# Altium schematic symbol library DIM.SCHLIB: 488 symbols (part 1 of 5)
Pins are listed as number, name and electrical type; pins without a type are passive.

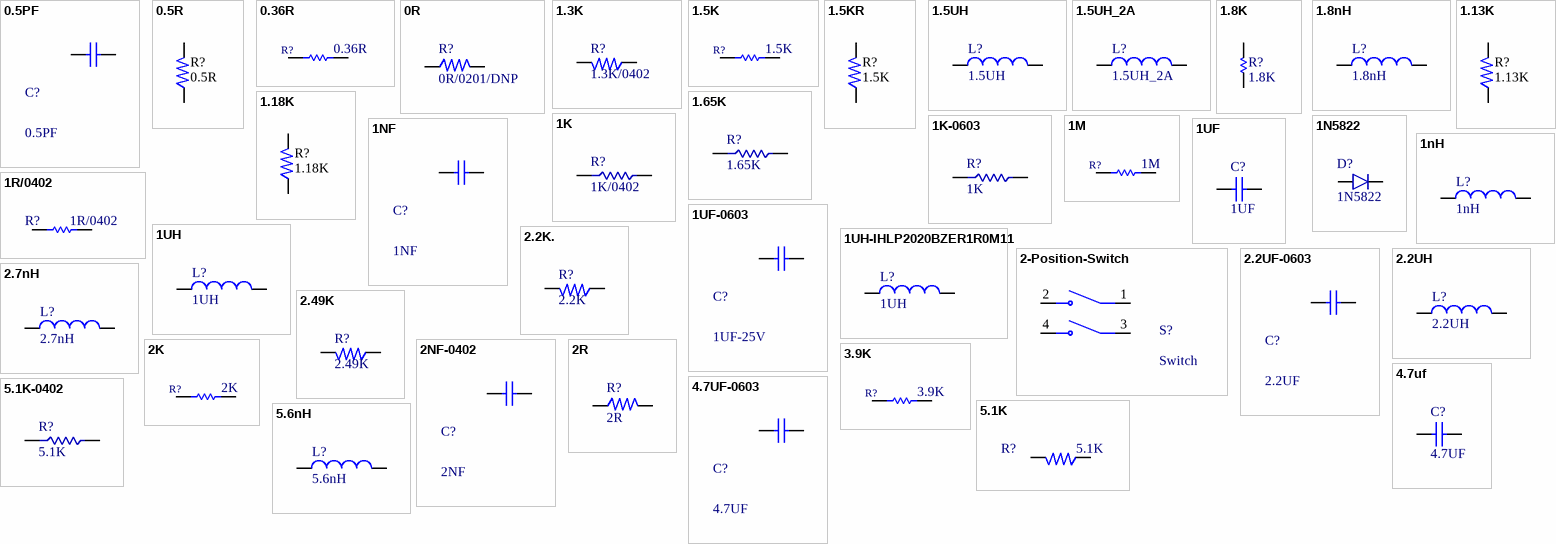
[diagram p0: symbols 0.5PF to 5.6nH]

## 0.5PF
designator C?
50V 0.5pF C0G 0201 Multilayer Ceramic Capacitors MLCC - SMD/SMT ROHS; Manufacturer: muRata; MPN: GRM0335C1HR50BA01D; SPN: C85920; Value: 0.5PF; Package: 0201; Supplier: LCSC; Operating Temperature: -55°C ~ 125°C
footprint CAP 0201/0603 (Chip Capacitor, 2-Leads, Body 0.60x0.30mm, IPC Medium Density)
pins: 1, 2

## 0.5R
designator R?
RES 500mΩ ±5% 100mW 0603; MPN: FRL0603JR500TS; Manufacturer: FOJAN; SPN: C2930046; Package: 0603 (1608 Metric); Value: 0.5R; Supplier: LCSC
footprint CAP 0603/1608 (Chip Capacitor, 2-Leads, Body 1.60x0.80mm, IPC High Density)
pins: 1, 2

## 0.36R
designator R?
RES 0.36 OHM 1% 1/6W 0402; Manufacturer: Panasonic Electronic Components; Manufacturer Part Number: ERJ-2BQFR36X; Package: 0402; Supplier: Digikey; Supplier Part Number: P.36AKCT-ND; Temperature: -55 to 155; Value: 0.36R
footprint RES 0402/1005 (Chip Resistor, 2-Leads, Body 1.0x0.5mm, IPC Medium Density)
pins: 1, 2

## 0R
designator R?, comment 0R/0201/DNP
RES 0 OHM JUMPER 1/20W 0201; Manufacturer: Stackpole Electronics Inc; Manufacturer Part Number: RMCF0201ZT0R00; Package: 0201 (0603 Metric); Supplier: Digi-Key; Supplier Part Number: RMCF0201ZT0R00TR-ND; Value: 0R/0201/DNP
footprint RES 0201/0603 (Chip Resistor, 2-Leads, Body 0.60x0.30mm, IPC Medium Density)
pins: 1, 2

## 1.3K
designator R?, comment 1.3K/0402
62.5mW Thick Film Resistors ±5% ±200ppm/℃ 1.3kΩ 0402 Chip Resistor - Surface Mount ROHS; Manufacturer: BOURNS; MPN: CR0402-JW-132GLF; SPN: C203118; Package: 0402 (1005 Metric); Value: 1.3K/0402; Supplier: LCSC; Operating Temperature: -55°C ~ 155°C; Supplier Availability: Active
footprint RES 0402/1005 (Chip Resistor, 2-Leads, Body 1.0x0.5mm, IPC Medium Density)
pins: 1, 2

## 1.5K
designator R?
RES 1.5K OHM 1% 1/16W 0402; Manufacturer: Stackpole Electronics Inc; Manufacturer Part Number: RMCF0402FT1K50; Package: 0402; Supplier: Digikey; Supplier Part Number: RMCF0402FT1K50TR-ND; Temperature: -55 to 155; Value: 1.5K
footprint RES 0402/1005 (Chip Resistor, 2-Leads, Body 1.0x0.5mm, IPC Medium Density)
pins: 1, 2

## 1.5KR
designator R?, comment 1.5K
RES 1.5K OHM 1% 1/10W 0603; MPN: RC0603FR-071K5L; Manufacturer: YAGEO; Package: 0603 (1608 Metric); Value: 1.5K
pins: 1, 2

## 1.5UH
designator L?
FIXED IND 1.5UH 3A 82 MOHM SMD; Manufacturer: Murata Electronics; Manufacturer Part Number: DFE252010P-1R5M=P2; Package: SMD/SMT; Supplier: Digi-Key; Supplier Part Number: 490-10636-2-ND; Unit Price: *; Value: 1.5UH
footprint 1.5UH
pins: 1, 2

## 1.5UH_2A
designator L?
FIXED IND 1.5UH 2A 94 MOHM SMD; Manufacturer: Murata Electronics; Manufacturer Part Number: DFE201612R-H-1R5M=P2; Package: SMD/SMT; Supplier: Digi-Key; Supplier Part Number: 490-10625-2-ND; Unit Price: *; Value: 1.5UH_2A
footprint 1.5UH_2A
pins: 1, 2

## 1.8K
designator R?
RES SMD 1.8K OHM 0.1% 1/16W 0402; Manufacturer Part Number: ERA-2ARB182X; Manufacturer: Panasonic Electronic Components; package: 0402; Supplier: Digikey; Supplier Part Number: P1.8KCPTR-ND; Temperature: -55 to 155; value: 1.8K
footprint CAPC1005L (Chip Capacitor, Body 1.0x0.5mm, IPC High Density)
pins: 1, 2

## 1.8nH
designator L?
950mA 1.8nH 80mΩ 0402 Inductors (SMD) ROHS; Manufacturer: Murata Electronics; MPN: LQG15HS1N8S02D; MPN: C77107; Package: 0402; Supplier: LCSC; Unit Price: *; Value: 1.8nH
pins: 1, 2

## 1.13K
designator R?
RES 1.13K OHM 1% 1/10W 0603; MPN: RC0603FR-071K13L; Manufacturer: YAGEO; Package: 0603 (1608 Metric); Value: 1.13K
pins: 1, 2

## 1.18K
designator R?
RES 1.18K OHM 1% 1/10W 0603; MPN: RC0603FR-071K18L; Manufacturer: YAGEO; Package: 0603 (1608 Metric); Value: 1.18K
pins: 1, 2

## 1.65K
designator R?
RES 1.65kΩ ±1% 100mW 0603; Manufacturer: FOJAN; Manufacturer Part Number: FRC0603F1651TS; Package: 06-3; Supplier Part Number: C2930051; Value: 1.65K; Supplier: LCSC; Operating Temperature: -55°C ~ 155°C; Supplier Availability: Active
footprint CAP 0603/1608 (Chip Capacitor, 2-Leads, Body 1.60x0.80mm, IPC High Density)
pins: 1, 2

## 1K
designator R?, comment 1K/0402
RES 1K OHM 1% 1/16W 0402; Manufacturer: Stackpole Electronics Inc; Manufacturer Part Number: RMCF0402FT1K00; Package: 0402 (1005 Metric); Supplier Part Number: RMCF0402FT1K00TR-ND; Value: 1K/0402; Supplier: Digi-Key; Operating Temperature: -55°C ~ 155°C; Supplier Availability: Active
footprint RES 0402/1005 (Chip Resistor, 2-Leads, Body 1.0x0.5mm, IPC Medium Density)
pins: 1, 2

## 1K-0603
designator R?, comment 1K
RES 1kΩ ±1% 100mW 0603; Manufacturer: YAGEO; Manufacturer Part Number: RC0603FR-071KL; Package: 0603; Supplier Part Number: C22548; Value: 1K; Supplier: LCSC; Operating Temperature: -55°C ~ 155°C; Supplier Availability: Active
footprint CAP 0603/1608 (Chip Capacitor, 2-Leads, Body 1.60x0.80mm, IPC High Density)
pins: 1, 2

## 1M
designator R?
RES SMD 1M OHM 1% 1/10W 0603; Manufacturer: Rohm Semiconductor; Manufacturer Part Number: ESR01MZPJ105; Package: 0402; Supplier: Digikey; Supplier Part Number: RHM1005CT-ND; Temperature: -55 to 155; Value: 1M
simulation model RESISTOR (Resistor)
signal-integrity model Res
footprint CAPC1005L (Chip Capacitor, Body 1.0x0.5mm, IPC High Density)
pins: 1, 2

## 1N5822
designator D?
DIODE SCHOTTKY 40V 3A DO201AD; Manufacturer Part Number: 1N5822-TP; Manufacturer: Micro Commercial Co; Supplier Part Number: 1N5822-TPMSTR-ND; Supplier: Digi-Key; Value: 1N5822; Supplier Availability: Active
pins: 1, 2

## 1NF
designator C?
CAP CER 1nF 50V X7R 0603; Manufacturer: Samsung Electro-Mechanics; MPN: CL10B102KB8NNNC; SPN: C1588; Value: 1NF; Package: 0603; Supplier: LCSC; Operating Temperature: -55°C ~ 125°C
footprint CAP 0603/1608 (Chip Capacitor, 2-Leads, Body 1.60x0.80mm, IPC High Density)
pins: 1, 2

## 1nH
designator L?
750mA 1nH 100mΩ 0201 Inductors (SMD) ROHS; Manufacturer: Murata Electronics; MPN: LQP03TN1N0B02D; MPN: C98039; Package: 0201; Supplier: LCSC; Unit Price: *; Value: 1nH
footprint CAP 0201/0603 (Chip Capacitor, 2-Leads, Body 0.60x0.30mm, IPC Medium Density)
pins: 1, 2

## 1R/0402
designator R?
Resistor; Manufacturer: Vishay Dale; Manufacturer Part Number: CRCW04021R00JNEDHP; Package: 0402 (1005 Metric); Supplier: DigiKey; Supplier Part Number: 541-1.0YATR-ND; Temperature: -55°C ~ 155°C; Value: 1R/0402
simulation model RESISTOR (Resistor)
signal-integrity model Res
footprint CAPC1005L (Chip Capacitor, Body 1.0x0.5mm, IPC High Density)
pins: 1, 2

## 1UF
designator C?
CAP CER 1uF 50V X7R 0805; Manufacturer: Samsung Electro-Mechanics; Manufacturer Part Number: CL21B105KBFNNNE; Value: 1UF; Package: 0805; Supplier: LCSC; Supplier Part Number: C28323
footprint CAP 0805/2012 (Chip Capacitor, 2-Leads, Body 2.00x1.20mm, IPC High Density)
pins: 1, 2

## 1UF-0603
designator C?, comment 1UF-25V
50V 2.2nF X7R ±10% 0402 Multilayer Ceramic Capacitors MLCC - SMD/SMT ROHS; Manufacturer: Samsung Electro-Mechanics; MPN: CL10B105KA8NNNC; SPN: C29936; Value: 1UF-25V; Package: 0603; Supplier: LCSC; Operating Temperature: -55°C ~ 125°C
footprint CAP 0603/1608 (Chip Capacitor, 2-Leads, Body 1.60x0.80mm, IPC High Density)
pins: 1, 2

## 1UH
designator L?
12A 1uH Molded Inductor ±20% 15A SMD,6.6x7mm Power Inductors ROHS; Manufacturer: cjiang (Changjiang Microelectronics Tech); Manufacturer Part Number: FXL0630-1R0-M; Package: SMD/SMT; Supplier: LCSC; Supplier Part Number: C167216; Unit Price: *; Value: 1UH
footprint 1UH
pins: 1, 2

## 1UH-IHLP2020BZER1R0M11
designator L?, comment 1UH
FIXED IND 1UH 7.5A 18.1 MOHM SMD; Manufacturer: Vishay Dale; MPN: IHLP2020BZER1R0M11; MPN: 541-1218-1-ND; Package: SMD; Supplier: DigiKey; Unit Price: *; Value: 1UH
footprint IHLP-2020BZ_VIS
pins: 1, 2

## 2-Position-Switch
designator S?, comment Switch
2Bit SPST 24V Black 25mA 3千次 Slide (Standard),凹槽式 SMD DIP Switches ROHS; Manufacturer: SHOU HAN; MPN: 1.27-2P TPPT; SPN: C7421516; Package: SMD; Supplier: LCSC; Value: Switch
pins: 1 COM1, 2 NO1, 3 COM2, 4 NO2

## 2.2K.
designator R?, comment 2.2K
62.5mW Thick Film Resistors 50V ±100ppm/℃ ±1% 2.2kΩ 0402 Chip Resistor - Surface Mount ROHS; Manufacturer: UNI-ROYAL(Uniroyal Elec); MPN: 0402WGF2201TCE; SPN: C25879; Package: 0402 (1005 Metric); Value: 2.2K; Supplier: LCSC; Operating Temperature: -55°C ~ 155°C; Supplier Availability: Active
pins: 1, 2

## 2.2UF-0603
designator C?, comment 2.2UF
25V 2.2uF X5R ±10% 0603 Multilayer Ceramic Capacitors MLCC - SMD/SMT ROHS; Manufacturer: Samsung Electro-Mechanics; MPN: CL10A225KA8NNNC; SPN: C57895; Value: 2.2UF; Package: 0603; Supplier: LCSC; Operating Temperature: -55°C ~ 125°C
footprint CAP 0603/1608 (Chip Capacitor, 2-Leads, Body 1.60x0.80mm, IPC High Density)
pins: 1, 2

## 2.2UH
designator L?
FIXED IND 2.2UH 1.58A 126 MOHM; Manufacturer: TDK Corporation; Manufacturer Part Number: VLS252010CX-2R2M-1; Package: SMD/SMT; Supplier: Digi-Key; Supplier Part Number: 445-172972-2-ND; Unit Price: *; Value: 2.2UH
pins: 1, 2

## 2.7nH
designator L?
800mA 2.7nH 120mΩ 0402 Inductors (SMD) ROHS; Manufacturer: Murata Electronics; MPN: LQG15HS2N7S02D; MPN: C77108; Package: 0402; Supplier: LCSC; Unit Price: *; Value: 2.7nH
pins: 1, 2

## 2.49K
designator R?
RES 2.49kΩ ±1% 100mW 0603; Manufacturer: FOJAN; MPN: FRC0603F2491TS; SPN: C2930072; Package: 0603; Value: 2.49K; Supplier: LCSC; Operating Temperature: -55°C ~ 155°C; Supplier Availability: Active
footprint CAP 0603/1608 (Chip Capacitor, 2-Leads, Body 1.60x0.80mm, IPC High Density)
pins: 1, 2

## 2K
designator R?
RES 2K OHM 1% 1/16W 0402; Manufacturer: Stackpole Electronics Inc; Manufacturer Part Number: RMCF0402FT2K00; Package: 0402; Supplier: Digikey; Supplier Part Number: RMCF0402FT2K00TR-ND; Temperature: -55 to 155; Value: 2K
footprint RES 0402/1005 (Chip Resistor, 2-Leads, Body 1.0x0.5mm, IPC Medium Density)
pins: 1, 2

## 2NF-0402
designator C?, comment 2NF
CAP CER 2000PF 25V C0G/NP0 0402; Manufacturer: KEMET; MPN: C0402C202J3GACTU; SPN: 399-9950-1-ND; Value: 2NF; Package: 0402; Supplier: DigiKey; Operating Temperature: -55°C ~ 125°C
footprint CAP 0402/1005 (Chip Capacitor, 2-Leads, Body 1.02x0.51mm, IPC Medium Density)
pins: 1, 2

## 2R
designator R?
125mW Thick Film Resistor 150V ±5% ±200ppm/℃ 2Ω 0805 Chip Resistor - Surface Mount ROHS; Manufacturer: FOJAN; Manufacturer Part Number: FRC0805J2R0TS; Package: 0805; Supplier: LCSC; Supplier Part Number: C2930265; Value: 2R
footprint CAP 0805/2012 (Chip Capacitor, 2-Leads, Body 2.00x1.20mm, IPC High Density)
pins: 1, 2

## 3.9K
designator R?
RES SMD 3.9K OHM 1% 1/10W 0402; Manufacturer: Panasonic Electronic Components; Manufacturer Part Number: ERJ-2RKF3901X; Package: 0402; Supplier: Digikey; Supplier Part Number: P3.90KLTR-ND; Temperature: -55 to 155; Value: 3.9K
footprint RES 0402/1005 (Chip Resistor, 2-Leads, Body 1.0x0.5mm, IPC Medium Density)
pins: 1, 2

## 4.7uf
designator C?, comment 4.7UF
CAP CER 4.7UF 10V X5R 0402; Manufacturer: Venkel; Manufacturer Part Number: C0402X5R100-475KNP; Value: 4.7UF; Package: 0402 (1005 Metric); Supplier: Digi-Key; Supplier Part Number: 2679-C0402X5R100-475KNPTR-ND
footprint CAP 0402/1005 (Chip Capacitor, 2-Leads, Body 1.02x0.51mm, IPC Medium Density)
pins: 1, 2

## 4.7UF-0603
designator C?, comment 4.7UF
CAP CER 4.7uF 35V X5R 0603; Manufacturer: muRata; MPN: GRM188R6YA475KE15D; SPN: C162274; Value: 4.7UF; Package: 0603; Supplier: LCSC; Operating Temperature: -55°C ~ 125°C
footprint CAP 0603/1608 (Chip Capacitor, 2-Leads, Body 1.60x0.80mm, IPC High Density)
pins: 1, 2

## 5.1K
designator R?
RES 5.1K OHM 1% 1/10W 0603; Manufacturer: YAGEO; MPN: RC0603FR-105K1L; SPN: 13-RC0603FR-105K1LCT-ND; Supplier: Digi-Key; Package / Case: 0603 (1608 Metric); Value: 5.1K
pins: 1, 2

## 5.1K-0402
designator R?, comment 5.1K
62.5mW Thick Film Resistor 50V ±100ppm/℃ ±1% 5.1kΩ 0402 Chip Resistor - Surface Mount ROHS; Manufacturer: UNI-ROYAL; Manufacturer Part Number: 0402WGF5101TCE; Package: 0402 (1005 Metric); Supplier Part Number: C25905; Value: 5.1K; Supplier: LCSC
footprint RES 0402/1005 (Chip Resistor, 2-Leads, Body 1.0x0.5mm, IPC Medium Density)
pins: 1, 2

## 5.6nH
designator L?
Fixed Inductors 1005 5.6nH Unshld 5% 760mA 83mOhms AECQ2; Manufacturer: Coilcraft; Manufacturer Part Number: 0402CS-5N6XJLU; Package: 0402; Supplier: Mouser; Supplier Part Number: 994-0402CS-5N6XJLU; Unit Price: *; Value: 5.6nH
footprint CAP 0402/1005 (Chip Capacitor, 2-Leads, Body 1.02x0.51mm, IPC Medium Density)
pins: 1, 2

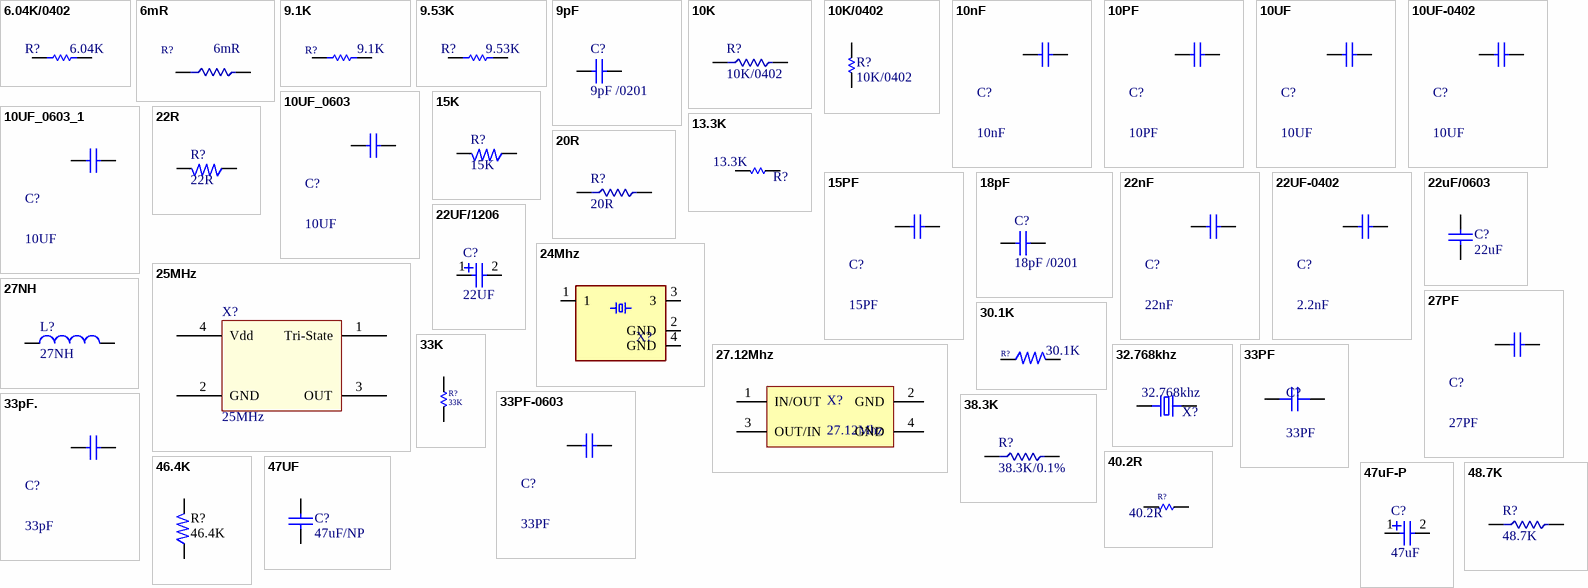
[diagram p1: symbols 6.04K/0402 to 48.7K]

## 6.04K/0402
designator R?, comment 6.04K
RES 6.04K OHM 1% 1/16W 0402; Manufacturer: Stackpole Electronics Inc; Manufacturer Part Number: RMCF0402FT6K04; Package: 0402 (1005 Metric); Supplier: DigiKey; Supplier Part Number: RMCF0402FT6K04TR-ND; Temperature: -55°C ~ 155°C; Value: 6.04K
simulation model RESISTOR (Resistor)
signal-integrity model Res
footprint CAPC1005L (Chip Capacitor, Body 1.0x0.5mm, IPC High Density)
pins: 1, 2

## 6mR
designator R?
RES 6mΩ ±1% 1W 1206; Manufacturer: prosemi; Manufacturer Part Number: MSR12A1R006F2; Package: 1206; Supplier: LCSC; Supplier Part Number: C21261095; Temperature: -55 to 155; Value: 6mR
footprint CAP 1206/3216 (Chip Capacitor, 2-Leads, Body 3.25x1.60mm, IPC Medium Density)
pins: 1, 2

## 9.1K
designator R?
RES SMD 9.1K OHM 1% 1/10W 0402; Manufacturer: Panasonic Electronic Components; Manufacturer Part Number: ERJ-2RKF9101X; Package: 0402; Supplier: Digikey; Supplier Part Number: P9.10KLTR-ND; Temperature: -55 to 155; Value: 9.1K
footprint RES 0402/1005 (Chip Resistor, 2-Leads, Body 1.0x0.5mm, IPC Medium Density)
pins: 1, 2

## 9.53K
designator R?
RES 9.53K OHM 1% 1/16W 0402; Manufacturer: Stackpole Electronics Inc; Manufacturer Part Number: RMCF0402FT9K53; Package: 0402 (1005 Metric); Supplier: DigiKey; Supplier Part Number: RMCF0402FT9K53TR-ND; Temperature: -55°C ~ 155°C; Value: 9.53K
simulation model RESISTOR (Resistor)
signal-integrity model Res
footprint CAPC1005L (Chip Capacitor, Body 1.0x0.5mm, IPC High Density)
pins: 1, 2

## 9pF
designator C?, comment 9pF /0201
CAP CER 9PF 50V C0G 0201; Manufacturer: TDK Corporation; Manufacturer Part Number: CGA1A2C0G1H090D030BA; Value: 9pF /0201; Package: 0201 (0603 Metric); Supplier: Digi-Key; Supplier Part Number: 445-12058-2-ND
footprint CAP 0201/0603 (Chip Capacitor, 2-Leads, Body 0.60x0.30mm, IPC Medium Density)
pins: 1, 2

## 10K
designator R?, comment 10K/0402
62.5mW Thick Film Resistors 50V ±1% 10kΩ 0402 Chip Resistor - Surface Mount ROHS; Manufacturer: VO; MPN: SCR0402F10K; SPN: C3015825; Package: 0402 (1005 Metric); Value: 10K/0402; Supplier: LCSC; Operating Temperature: -55°C ~ 155°C; Supplier Availability: Active
footprint RES 0402/1005 (Chip Resistor, 2-Leads, Body 1.0x0.5mm, IPC Medium Density)
pins: 1, 2

## 10K/0402
designator R?
RES SMD 10K OHM 1% 1/16W 0402; Manufacturer Part Number: CRCW040210K0FKEDHP; Manufacturer: Vishay Dale; package: 0402; Supplier: Digikey; Supplier Part Number: 541-10.0KYCT-ND; Temperature: -55 to 155; value: 10K/0402
footprint CAPC1005L (Chip Capacitor, Body 1.0x0.5mm, IPC High Density)
pins: 1, 2

## 10nF
designator C?
50V 10nF X7R ±10% 0402 Multilayer Ceramic Capacitors MLCC - SMD/SMT ROHS; Manufacturer: YAGEO; MPN: CC0402KRX7R9BB103; SPN: C60133; Value: 10nF; Package: 0402 (1005 Metric); Supplier: LCSC; Operating Temperature: -55°C ~ 125°C
pins: 1, 2

## 10PF
designator C?
CAP CER 10pF 50V C0G 0201; Manufacturer: muRata; MPN: GRM0335C1H100FA01D; SPN: C384956; Value: 10PF; Package: 0201; Supplier: LCSC; Operating Temperature: -55°C ~ 125°C
footprint CAP 0201/0603 (Chip Capacitor, 2-Leads, Body 0.60x0.30mm, IPC Medium Density)
pins: 1, 2

## 10UF
designator C?
25V 10uF X5R ±10% 0805 Multilayer Ceramic Capacitors MLCC - SMD/SMT ROHS; Manufacturer: Samsung Electro-Mechanics; MPN: CL21A106KAYNNNE; SPN: C15850; Value: 10UF; Package: 0805; Supplier: LCSC; Operating Temperature: -55°C ~ 125°C
footprint CAP 0805/2012 (Chip Capacitor, 2-Leads, Body 2.00x1.20mm, IPC High Density)
pins: 1, 2

## 10UF-0402
designator C?, comment 10UF
10V 10uF X5R ±20% 0402 Multilayer Ceramic Capacitors MLCC - SMD/SMT ROHS; Manufacturer: Samsung Electro-Mechanics; MPN: CL05A106MP5NUNC; SPN: C315248; Value: 10UF; Package: 0402; Supplier: LCSC; Operating Temperature: -55°C ~ 125°C
footprint CAP 0402/1005 (Chip Capacitor, 2-Leads, Body 1.02x0.51mm, IPC Medium Density)
pins: 1, 2

## 10UF_0603
designator C?, comment 10UF
25V 10uF X5R ±20% 0603 Multilayer Ceramic Capacitors MLCC - SMD/SMT ROHS; Manufacturer: YAGEO; MPN: CL10A106MA8NRNC; SPN: C96446; Value: 10UF; Package: 0603; Supplier: LCSC; Operating Temperature: -55°C ~ 125°C
footprint RES 0603/1608 (Chip Resistor, 2-Leads, Body 1.60x0.80mm, IPC Medium Density)
pins: 1, 2

## 10UF_0603_1
designator C?, comment 10UF
25V 10uF X5R ±20% 0603 Multilayer Ceramic Capacitors MLCC - SMD/SMT ROHS; Manufacturer: Murata Electronics; MPN: GRM188R6YA106MA73D; SPN: 490-13248-1-ND; Value: 10UF; Package: 0603; Supplier: DigiKey; Operating Temperature: -55°C ~ 125°C
footprint RES 0603/1608 (Chip Resistor, 2-Leads, Body 1.60x0.80mm, IPC Medium Density)
pins: 1, 2

## 13.3K
designator R?
RES SMD 10K OHM 1% 1/16W 0402; Manufacturer: Panasonic Electronic Components; Manufacturer Part Number: ERA-2AEB1332X; Package: 0402; Supplier: Digikey; Supplier Part Number: P13.3KDCTR-ND; Temperature: -55°C ~ 155°C; value: 13.3K
footprint CAPC1005L (Chip Capacitor, Body 1.0x0.5mm, IPC High Density)
pins: 1, 2

## 15K
designator R?
62.5mW Thick Film Resistors 50V ±100ppm/℃ ±1% 15kΩ 0402 Chip Resistor - Surface Mount ROHS; Manufacturer: UNI-ROYAL(Uniroyal Elec); MPN: 0402WGF1502TCE; SPN: C25756; Package: 0402 (1005 Metric); Value: 15K; Supplier: LCSC; Operating Temperature: -55°C ~ 155°C; Supplier Availability: Active
pins: 1, 2

## 15PF
designator C?
CAP CER 15PF 50V C0G/NP0 0603; Manufacturer: Walsin Technology Corporation; MPN: 0603N150F500CT; SPN: 1292-1485-6-ND; Value: 15PF; Package: 0603; Supplier: DigiKey; Operating Temperature: -55°C ~ 125°C
footprint CAP 0603/1608 (Chip Capacitor, 2-Leads, Body 1.60x0.80mm, IPC High Density)
pins: 1, 2

## 18pF
designator C?, comment 18pF /0201
CAP CER 18PF 25V C0G 0201; Manufacturer: TDK Corporation; Manufacturer Part Number: C0603C0G1E180J030BA; Value: 18pF /0201; Package: 0201 (0603 Metric); Supplier: Digi-Key; Supplier Part Number: 445-4657-2-ND
footprint CAP 0201/0603 (Chip Capacitor, 2-Leads, Body 0.60x0.30mm, IPC Medium Density)
pins: 1, 2

## 20R
designator R?
62.5mW Thick Film Resistor 50V ±1% ±200ppm/℃ 20Ω 0402 Chip Resistor - Surface Mount ROHS; Manufacturer: UNI-ROYAL; Manufacturer Part Number: 0402WGF200JTCE; Package: 0402; Supplier Part Number: C25089; Value: 20R; Supplier: LCSC
footprint CAP 0402/1005 (Chip Capacitor, 2-Leads, Body 1.02x0.51mm, IPC Medium Density)
pins: 1, 2

## 22nF
designator C?
CAP CER 0402 22NF 50V X7R 10%; Manufacturer: KEMET; Manufacturer Part Number: C0402C223K5REC7411; Value: 22nF; Package: 0402 (1005 Metric); Supplier: Digi-Key; Supplier Part Number: 399-C0402C223K5REC7411TR-ND; Operating Temperature: -55°C ~ 125°C
footprint CAP 0402/1005 (Chip Capacitor, 2-Leads, Body 1.02x0.51mm, IPC Medium Density)
pins: 1, 2

## 22R
designator R?
62.5mW Thick Film Resistors 50V ±1% ±100ppm/℃ 22Ω 0402 Chip Resistor - Surface Mount ROHS; Manufacturer: UNI-ROYAL(Uniroyal Elec); MPN: 0402WGF220JTCE; SPN: C25092; Package: 0402 (1005 Metric); Value: 22R; Supplier: LCSC; Operating Temperature: -55°C ~ 155°C; Supplier Availability: Active
pins: 1, 2

## 22UF-0402
designator C?, comment 2.2nF
10V 22uF X5R ±20% 0402 Multilayer Ceramic Capacitors MLCC - SMD/SMT ROHS; Manufacturer: HRE; MPN: CGA0402X5R226M100GT; SPN: C6119813; Value: 2.2nF; Package: 0402 (1005 Metric); Supplier: LCSC; Operating Temperature: -55°C ~ 125°C
footprint CAP 0402/1005 (Chip Capacitor, 2-Leads, Body 1.02x0.51mm, IPC Medium Density)
pins: 1, 2

## 22uF/0603
designator C?, comment 22uF
16V 22uF X5R ±20% 0603 Multilayer Ceramic Capacitors MLCC - SMD/SMT ROHS; Manufacturer: Samsung Electro-Mechanics; Manufacturer Part Number: CL10A226MO7JZNC; Package: 0603; Supplier: LCSC; Supplier Part Number: C2762594; Temperature: -55°C ~ 85°C; Value: 22uF
footprint CAP 0603/1608 (Chip Capacitor, 2-Leads, Body 1.60x0.80mm, IPC High Density)
pins: 1, 2

## 22UF/1206
designator C?, comment 22UF
CAP TANT 22UF 20% 16V 1206; Manufacturer: AVX Corporation; Manufacturer Part Number: F931C226MAAAJ6; Value: 22UF; Package: 1206 (3216 Metric); Supplier: Digi-Key; Supplier Part Number: 478-13100-2-ND
footprint CAP 1206/3216-P (Chip Capacitor, 2-Leads, Body 3.25x1.60mm, IPC Medium Density)
pins: 1, 2

## 24Mhz
designator X?
CRYSTAL 24.0000MHZ 18PF SMD; Manufacturer: Abracon LLC; Manufacturer Part Number: ABM8-24.000MHZ-B2-T; Package: SMD; Supplier: Digikey; Supplier Part Number: 535-9138-1-ND; Temperature: -55°C ~ 155°C
footprint 24Mhz
pins: 1, 2 GND (power), 3, 4 GND (power)

## 25MHz
designator X?
XTAL OSC XO 25.0000MHZ CMOS SMD; Manufacturer: Abracon LLC; Manufacturer Part Number: ASE-25.000MHZ-LC-T; Value: 25MHz; Package: 4-SMD, No Lead; Supplier: Digikey; Supplier Part Number: 535-9568-2-ND
pins: 1 Tri-State, 2 GND, 3 OUT, 4 Vdd

## 27.12Mhz
designator X?
27.12 MHz Â±10ppm Crystal 10pF 60 Ohms 4-SMD, No Lead; SPN: XC2511CT-ND; MF: ECS Inc.; MP: ECS-271.2-10-37-CKM-TR; Package: ECX-1637-37-4 ECS; Value: 27.12Mhz; Supplier: DigiKey
footprint 27.12Mhz
pins: 1 IN/OUT, 2 GND, 3 OUT/IN, 4 GND

## 27NH
designator L?
FIXED IND 27NH 350MA 460 MOHM; Manufacturer: Murata Electronics; Manufacturer Part Number: LQG15HS27NJ02D; Package: 0402 (1005 Metric); Supplier: Digi-Key; Supplier Part Number: 490-2628-2-ND; Value: 27NH
footprint CAP 0402/1005 (Chip Capacitor, 2-Leads, Body 1.02x0.51mm, IPC Medium Density)
pins: 1, 2

## 27PF
designator C?
CAP CER 27PF 50V NP0 0402; Manufacturer: AVX Corporation; Manufacturer Part Number: 04025A270FAT2A; Value: 27PF; Package: 0402 (1005 Metric); Supplier: Digi-Key; Supplier Part Number: 478-10094-2-ND; Operating Temperature: -55°C ~ 125°C
footprint CAP 0402/1005 (Chip Capacitor, 2-Leads, Body 1.02x0.51mm, IPC Medium Density)
pins: 1, 2

## 30.1K
designator R?
62.5mW Thick Film Resistor 50V ±100ppm/℃ ±1% 30.1kΩ 0402 Chip Resistor - Surface Mount ROHS; Manufacturer: YAGEO; Manufacturer Part Number: RC0402FR-0730K1L; Package: 0402 (1005 Metric); Supplier: LCSC; Supplier Part Number: C138009; value: 30.1K
footprint CAP 0402/1005 (Chip Capacitor, 2-Leads, Body 1.02x0.51mm, IPC Medium Density)
pins: 1, 2

## 32.768khz
designator X?
CRYSTAL 32.7680KHZ 9PF SMD; Manufacturer: ECS Inc.; Manufacturer Part Number: ECS-.327-9-1210-TR; Package: SMD; Supplier: Digikey; Supplier Part Number: XC2283TR-ND; Temperature: -55°C ~ 155°C
footprint 32.768khz
pins: 1 IN/OUT, 2 OUT/IN

## 33K
designator R?
RES 33K OHM 1% 1/16W 0402; Manufacturer Part Number: RMCF0402FT33K0; Manufacturer: Stackpole Electronics Inc; TEMP: -55°C ~ 155°C; package: 0402 (1005 Metric); Supplier: Digikey; Supplier Part Number: RMCF0402FT33K0TR-ND; value: 33K
footprint CAP 0402/1005 (Chip Capacitor, 2-Leads, Body 1.02x0.51mm, IPC Medium Density)
pins: 1, 2

## 33PF
designator C?
Manufacturer: KEMET; Manufacturer Part Number: C0603C330J1GACTU; Value: 33PF; Package: 0603 (1608 Metric); Supplier: Digi-Key; Supplier Part Number: 399-7896-2-ND; Operating Temperature: -55°C ~ 125°C; Supplier Availability: Active
footprint CAPC1608L (Chip Capacitor, Body 1.6x0.8mm, IPC High Density)
pins: 1, 2

## 33PF-0603
designator C?, comment 33PF
CAP CER 33PF 50V C0G/NP0 0603; Manufacturer: Murata Electronics; MPN: GRM1885C1H330JA01D; SPN: 490-1415-6-ND; Value: 33PF; Package: 0603; Supplier: DigiKey; Operating Temperature: -55°C ~ 125°C
footprint CAP 0603/1608 (Chip Capacitor, 2-Leads, Body 1.60x0.80mm, IPC High Density)
pins: 1, 2

## 33pF.
designator C?, comment 33pF
50V 10nF X7R ±10% 0402 Multilayer Ceramic Capac50V 33pF NP0 ±5% 0402 Multilayer Ceramic Capacitors MLCC - SMD/SMT ROHS; Manufacturer: YAGEO; MPN: CC0402JRNPO9BN330; SPN: C107005; Value: 33pF; Package: 0402 (1005 Metric); Supplier: LCSC; Operating Temperature: -55°C ~ 125°C
pins: 1, 2

## 38.3K
designator R?, comment 38.3K/0.1%
RES SMD 38.3KOHM 0.1% 1/10W 0603; Manufacturer: Yageo; Manufacturer Part Number: RT0603BRD0738K3L; Package: 0603; Supplier Part Number: YAG4541DKR-ND; Value: 38.3K/0.1%; Supplier: Digi-Key; Operating Temperature: -55°C ~ 155°C; Supplier Availability: Active
footprint RESC1608L (Chip Resistor, Body 1.6x0.8mm, IPC High Density)
pins: 1, 2

## 40.2R
designator R?
RES SMD 40.2 OHM 0.1% 1/16W 0402; Manufacturer: TE Connectivity Passive Product; Manufacturer Part Number: CPF0402B40R2E1; Package: 0402 (1005 Metric); Supplier: DigiKey; Supplier Part Number: A102848TR-ND; Temperature: -55°C ~ 155°C; value: 40.2R
footprint CAPC1005L (Chip Capacitor, Body 1.0x0.5mm, IPC High Density)
pins: 1, 2

## 46.4K
designator R?
RES 46.4K OHM 1% 1/10W 0603; MPN: RC0603FR-0746K4L; Manufacturer: YAGEO; Package: 0603 (1608 Metric); Value: 46.4K
pins: 1, 2

## 47UF
designator C?, comment 47uF/NP
Capacitor; Manufacturer: Murata Electronics; Manufacturer Part Number: ZRB18AR60J476ME01L; Package: 0603 (1608 metric); Supplier: Mouser; Supplier Part Number: 81-ZRB18AR60J476ME1L; Temperature: -55°C ~ 85°C; Value: 47uF/NP
simulation model CAP (Capacitor)
signal-integrity model Cap
footprint CAPC1608L (Chip Capacitor, Body 1.6x0.8mm, IPC High Density)
pins: 1, 2

## 47uF-P
designator C?, comment 47uF
47uF 10V 4Ω@100kHz ±20% CASE-A-3216 Tantalum Capacitors ROHS; Manufacturer: CEC(Shenzhen Zhenhua XinYun Elec); MPN: CA45-A-10V-47uF-M; SPN: C688949; Value: 47uF; Package: CASE-A-3216; Supplier: LCSC
pins: 1, 2

## 48.7K
designator R?
RES 48.7kΩ ±1% 100mW 0603; Manufacturer: FOJAN; Manufacturer Part Number: FRC0603F4872TS; Package: 0603; Supplier Part Number: C2933226; Value: 48.7K; Supplier: LCSC; Operating Temperature: -55°C ~ 155°C; Supplier Availability: Active
footprint CAP 0603/1608 (Chip Capacitor, 2-Leads, Body 1.60x0.80mm, IPC High Density)
pins: 1, 2

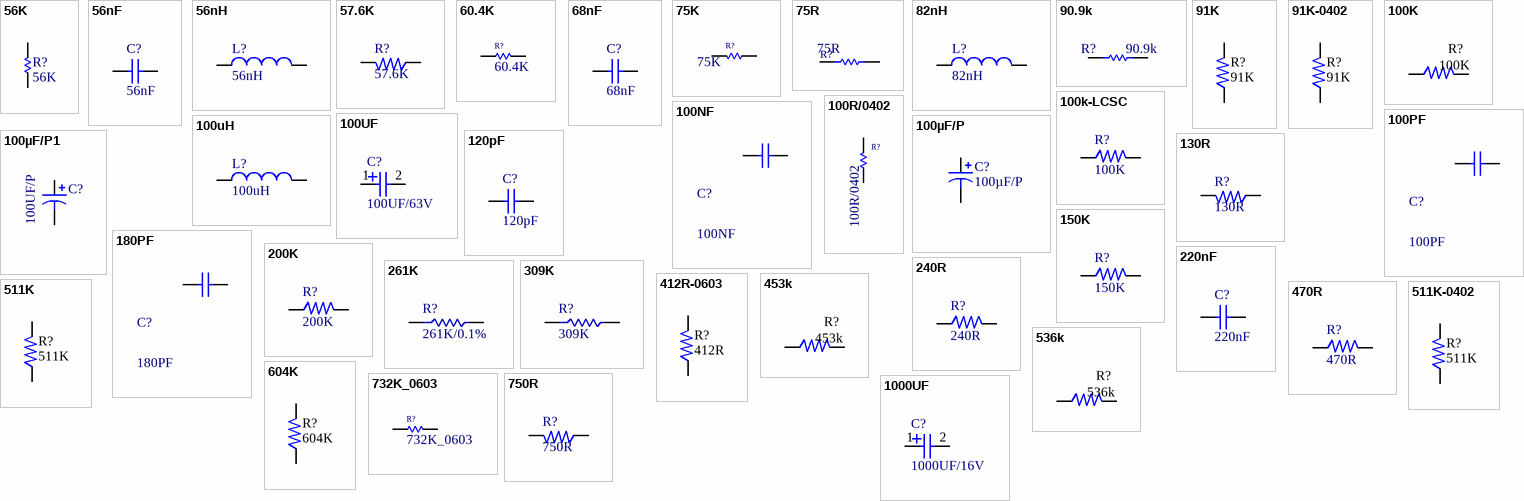
[diagram p2: symbols 56K to 1000UF]

## 56K
designator R?
RES 56K OHM 1% 1/16W 0402; Manufacturer Part Number: RMCF0402FT56K0; Manufacturer: Stackpole Electronics Inc; package: 0402; Supplier: Digikey; Supplier Part Number: RMCF0402FT56K0TR-ND; Temperature: -55 to 155; value: 56K
footprint CAPC1005L (Chip Capacitor, Body 1.0x0.5mm, IPC High Density)
pins: 1, 2

## 56nF
designator C?
CAP CER 56nF 50V X7R 0603; Manufacturer: YAGEO; Manufacturer Part Number: CC0603KRX7R9BB563; Value: 56nF; Package: 0603; Supplier: LCSC; Supplier Part Number: C282072
footprint CAP 0603/1608 (Chip Capacitor, 2-Leads, Body 1.60x0.80mm, IPC High Density)
pins: 1, 2

## 56nH
designator L?
100mA 56nH ±5% 970mΩ 0402 Inductors (SMD) ROHS; Manufacturer: APV; MPN: AHW1005C-56NJTF; SPN: C6807990; Package: 0402; Supplier: LCSC; Unit Price: *; Value: 56nH
pins: 1, 2

## 57.6K
designator R?
RES 57.6kΩ ±1% 100mW 0603; Manufacturer: YAGEO; MPN: RC0603FR-0757K6L; SPN: C245983; Package: 0603; Value: 57.6K; Supplier: LCSC; Operating Temperature: -55°C ~ 155°C; Supplier Availability: Active
footprint CAP 0603/1608 (Chip Capacitor, 2-Leads, Body 1.60x0.80mm, IPC High Density)
pins: 1, 2

## 60.4K
designator R?
RES SMD 10K OHM 1% 1/16W 0402; Manufacturer: Panasonic Electronic Components; Manufacturer Part Number: ERA-2AEB6042X; Package: 0402 (1005 Metric); Supplier: DigiKey; Supplier Part Number: P60.4KDCTR-ND; Temperature: -55°C ~ 155°C; value: 60.4K
footprint CAPC1005L (Chip Capacitor, Body 1.0x0.5mm, IPC High Density)
pins: 1, 2

## 68nF
designator C?
CAP CER 68nF 50V X7R 0603; Manufacturer: YAGEO; Manufacturer Part Number: CC0603KRX7R9BB683; Value: 68NF; Package: 0603; Supplier: LCSC; Supplier Part Number: C107098
footprint CAP 0603/1608 (Chip Capacitor, 2-Leads, Body 1.60x0.80mm, IPC High Density)
pins: 1, 2

## 75K
designator R?
RES 75K OHM 1% 1/16W 0402; Manufacturer: Stackpole Electronics Inc; Manufacturer Part Number: RMCF0402FT75K0; Package: 0402 (1005 Metric); Supplier: DigiKey; Supplier Part Number: RMCF0402FT75K0TR-ND; Temperature: -55°C ~ 155°C; value: 75K
footprint CAPC1005L (Chip Capacitor, Body 1.0x0.5mm, IPC High Density)
pins: 1, 2

## 75R
designator R?
RESA-AS 0402 75R 1% 63MW TC100; Manufacturer: Bourns Inc.; Manufacturer Part Number: CR0402AFX-75R0GAS; Package: 0402; Supplier: Digikey; Supplier Part Number: CR0402AFX-75R0GASTR-ND; Temperature: -55 to 155; Value: 75R
footprint RES 0402/1005 (Chip Resistor, 2-Leads, Body 1.0x0.5mm, IPC Medium Density)
pins: 1, 2

## 82nH
designator L?
FIXED IND 82NH 150MA 1.25OHM SMD; Manufacturer: Bourns Inc.; Manufacturer Part Number: CW105550A-82NJ; Package: 0402 (1005 Metric); Supplier: Digi-Key; Supplier Part Number: CW105550A-82NJTR-ND; Unit Price: *; Value: 82nH
footprint CAP 0402/1005 (Chip Capacitor, 2-Leads, Body 1.02x0.51mm, IPC Medium Density)
pins: 1, 2

## 90.9k
designator R?
RES 90.9K OHM 1% 1/16W 0402; Manufacturer: Stackpole Electronics Inc; Manufacturer Part Number: RMCF0402FT90K9; Package: 0402 (1005 Metric); Supplier: DigiKey; Supplier Part Number: RMCF0402FT90K9TR-ND; Temperature: -55°C ~ 155°C; Value: 90.9k
simulation model RESISTOR (Resistor)
signal-integrity model Res
footprint CAPC1005L (Chip Capacitor, Body 1.0x0.5mm, IPC High Density)
pins: 1, 2

## 91K
designator R?
100mW Thick Film Resistors 75V ±100ppm/℃ ±1% 91kΩ 0603 Chip Resistor - Surface Mount ROHS; MPN: C23265; Manufacturer: LCSC; Package: 0603 (1608 Metric); Value: 91K
footprint CAP 0603/1608 (Chip Capacitor, 2-Leads, Body 1.60x0.80mm, IPC High Density)
pins: 1, 2

## 91K-0402
designator R?, comment 91K
62.5mW Thick Film Resistor 50V ±100ppm/℃ ±1% 91kΩ 0402 Chip Resistor - Surface Mount ROHS; MPN: C327323; Manufacturer: LCSC; Package: 0402; Value: 91K
footprint CAP 0402/1005 (Chip Capacitor, 2-Leads, Body 1.02x0.51mm, IPC Medium Density)
pins: 1, 2

## 100K
designator R?
CRCW0402100KFKED; Manufacturer: Vishay-Dale; Package: 0402 (1005 Metric); MPN: CRCW0402100KFKED; Value: 100K
pins: 1, 2

## 100k-LCSC
designator R?, comment 100K
62.5mW Thick Film Resistor 50V ±100ppm/℃ ±1% 30.1kΩ 0402 Chip Resistor - Surface Mount ROHS; Manufacturer: YAGEO; Manufacturer Part Number: RC0402FR-0730K1L; Package: 0402; Supplier: LCSC; Supplier Part Number: C138009; Value: 100K
footprint CAP 0402/1005 (Chip Capacitor, 2-Leads, Body 1.02x0.51mm, IPC Medium Density)
pins: 1, 2

## 100NF
designator C?
50V 100nF X7R ±10% 0402 Multilayer Ceramic Capacitors MLCC - SMD/SMT ROHS; Manufacturer: muRata; MPN: GRM155R71H104KE14D; Value: 2.2nF; SPN: C77020; Package: 0402 (1005 Metric); Supplier: LCSC; Operating Temperature: -55°C ~ 125°C
footprint CAP 0402/1005 (Chip Capacitor, 2-Leads, Body 1.02x0.51mm, IPC Medium Density)
pins: 1, 2

## 100PF
designator C?
CAP CER 100PF 50V C0G/NP0 0603; Manufacturer: Murata Electronics; MPN: GRM1885C1H101JA01D; SPN: 490-1427-1-ND; Value: 100PF; Package: 0603; Supplier: DigiKey; Operating Temperature: -55°C ~ 125°C
footprint CAP 0603/1608 (Chip Capacitor, 2-Leads, Body 1.60x0.80mm, IPC High Density)
pins: 1, 2

## 100R/0402
designator R?
RES SMD 100 OHM 1% 1/16W 0402; Manufacturer Part Number: RC0402FR-07100RL; Manufacturer: Yageo; package: 0402; Supplier: Digikey; Supplier Part Number: 311-100LRTR-ND; Temperature: -55 to 155; value: 100R/0402
footprint RESC1005L (Chip Resistor, Body 1.1x0.5mm, IPC High Density)
pins: 1, 2

## 100UF
designator C?, comment 100UF/63V
CAP ALUM 100UF 20% 63V SMD; Manufacturer: Würth Elektronik; Manufacturer Part Number: 865060757007; Value: 100UF/63V; Package: SMD; Supplier: Digi-Key; Supplier Part Number: 732-865060757007TR-ND
pins: 1, 2

## 100uH
designator L?
FIXED IND 100UH 3.5A 405 MOHM; Manufacturer: Pulse Electronics Power; Manufacturer Part Number: PA4309.104NLT; Package: SMD/SMT; Supplier: Digi-Key; Supplier Part Number: 553-3606-2-ND; Unit Price: *; Value: 100uH
pins: 1, 2

## 100µF/P
designator C?
CAP TANT 100UF 20% 10V 1206; Manufacturer: KYOCERA AVX; Manufacturer Part Number: TLJA107M010R1400; Package: 1206(3216); Supplier: Digi-Key; Supplier Part Number: 478-5651-1-ND; Temperature: -55°C ~  125°C; Value: 100µF/P
footprint CAP 1206/3216-P (Chip Capacitor, 2-Leads, Body 3.25x1.60mm, IPC Medium Density)
pins: 1, 2
1 alternate drawing of the same symbol

## 100µF/P1
designator C?, comment 100UF/P
100uF 6.3V 5Ω@100kHz ±10% CASE-B-3528 Tantalum Capacitors ROHS; Manufacturer: CEC(Shenzhen Zhenhua XinYun Elec); MPN: CA45-B-6.3V-100uF-K; SPN: LCSC; Package: CASE-B-3528; Supplier: Digi-Key; Temperature: -55°C ~  125°C; Value: 100UF/P
pins: 1, 2
1 alternate drawing of the same symbol

## 120pF
designator C?
CAP CER 120PF 50V X7R 0402; Manufacturer: Yageo; Manufacturer Part Number: CC0402KRX7R9BB121; Value: 120pF; Package: 0402 (1005 Metric); Supplier: Digi-Key; Supplier Part Number: 311-3812-2-ND
footprint CAP 0402/1005 (Chip Capacitor, 2-Leads, Body 1.02x0.51mm, IPC Medium Density)
pins: 1, 2

## 130R
designator R?
100mW Thick Film Resistors 75V ±100ppm/℃ ±1% 130Ω 0603 Chip Resistor - Surface Mount ROHS; Manufacturer: UNI-ROYAL(Uniroyal Elec); MPN: 0603WAF1300T5E; SPN: C22796; Package: 0603; Value: 130R; Supplier: LCSC; Operating Temperature: -55°C ~ 155°C; Supplier Availability: Active
footprint LED_1608L (Chip Capacitor, Body 1.6x0.8mm, IPC High Density)
pins: 1, 2

## 150K
designator R?
RES 150K OHM 1% 1/16W 0402; Manufacturer: Stackpole Electronics Inc; Manufacturer Part Number: RMCF0402FT150K; Package: 0402 (1005 Metric); Supplier: Digi-Key; Supplier Part Number: RMCF0402FT150KTR-ND; Value: 150K; Operating Temperature: -55°C ~ 155°C
footprint RES 0402/1005 (Chip Resistor, 2-Leads, Body 1.0x0.5mm, IPC Medium Density)
pins: 1, 2

## 180PF
designator C?
CAP CER 180PF 50V C0G/NP0 0603; Manufacturer: KEMET; MPN: C0603C181F5GACTU; SPN: 399-C0603C181F5GACTUCT-ND; Value: 180PF; Package: 0603; Supplier: DigiKey; Operating Temperature: -55°C ~ 125°C
footprint CAP 0603/1608 (Chip Capacitor, 2-Leads, Body 1.60x0.80mm, IPC High Density)
pins: 1, 2

## 200K
designator R?
50mW Thick Film Resistors 25V ±1% ±200ppm/℃ 200kΩ 0201 Chip Resistor - Surface Mount ROHS; Manufacturer: YAGEO; MPN: RC0201FR-07200KL; SPN: C138163; Package: 0201 (0603 Metric); Supplier: LCSC; Value: 200K
footprint RES 0201/0603 (Chip Resistor, 2-Leads, Body 0.60x0.30mm, IPC Medium Density)
pins: 1, 2

## 220nF
designator C?
CAP CER 220NF 10V X7S 0402; Manufacturer: Samsung Electro-Mechanics; Manufacturer Part Number: CL05Y224KP5VPNC; Value: 220nF; Package: 0402 (1005 Metric); Supplier: Digi-Key; Supplier Part Number: 1276-CL05Y224KP5VPNCTR-ND
footprint CAP 0402/1005 (Chip Capacitor, 2-Leads, Body 1.02x0.51mm, IPC Medium Density)
pins: 1, 2

## 240R
designator R?
RES 240 OHM 1% 1/20W 0201; Manufacturer: Stackpole Electronics Inc; Manufacturer Part Number: RMCF0201FG240R; Package: 0201 (0603 Metric); Supplier: Digi-Key; Supplier Part Number: RMCF0201FG240RTR-ND; Value: 240R
footprint RES 0201/0603 (Chip Resistor, 2-Leads, Body 0.60x0.30mm, IPC Medium Density)
pins: 1, 2

## 261K
designator R?, comment 261K/0.1%
RES SMD 261K OHM 0.1% 1/10W 0603; Manufacturer: Yageo; Manufacturer Part Number: RT0603BRD07261KL; Package: 0603; Supplier Part Number: YAG1601TR-ND; Value: 261K/0.1%; Supplier: Digi-Key; Operating Temperature: -55°C ~ 155°C; Supplier Availability: Active
footprint RESC1608L (Chip Resistor, Body 1.6x0.8mm, IPC High Density)
pins: 1, 2

## 309K
designator R?
100mW Thick Film Resistor ±100ppm/℃ ±1% 309kΩ 0603 Chip Resistor - Surface Mount ROHS; Manufacturer: VISHAY; Manufacturer Part Number: CRCW0603309KFKEA; Package: 0603; Supplier Part Number: C4151043; Value: 309K; Supplier: LCSC
footprint CAP 0603/1608 (Chip Capacitor, 2-Leads, Body 1.60x0.80mm, IPC High Density)
pins: 1, 2

## 412R-0603
designator R?, comment 412R
100mW Thin Film Resistor 75V ±25ppm/℃ ±0.1% 412Ω 0603 Chip Resistor - Surface Mount ROHS; MPN: FRC0603F4120TS; Manufacturer: FOJAN; SPN: C5126258; Package: 0603 (1608 Metric); Value: 412R; Supplier: LCSC
footprint CAP 0603/1608 (Chip Capacitor, 2-Leads, Body 1.60x0.80mm, IPC High Density)
pins: 1, 2

## 453k
designator R?
CRCW0402453KFKED; Manufacturer: Vishay-Dale; Package: 0402 (1005 Metric); MPN: CRCW0402453KFKED; Value: 453k
pins: 1, 2

## 470R
designator R?
RES 470Ω ±1% 1/16W 0402; Manufacturer: UNI-ROYAL; Manufacturer Part Number: 0402WGF4700TCE; Package: 0402; Supplier: LCSC; Supplier Part Number: C25117; Value: 470R
footprint CAP 0402/1005 (Chip Capacitor, 2-Leads, Body 1.02x0.51mm, IPC Medium Density)
pins: 1, 2

## 511K
designator R?
100mW Thick Film Resistors 75V ±100ppm/℃ ±1% 511kΩ 0603 Chip Resistor - Surface Mount ROHS; MPN: C23194; Manufacturer: LCSC; Package: 0603 (1608 Metric); Value: 511K
footprint CAP 0603/1608 (Chip Capacitor, 2-Leads, Body 1.60x0.80mm, IPC High Density)
pins: 1, 2

## 511K-0402
designator R?, comment 511K
62.5mW Thick Film Resistor 50V ±100ppm/℃ ±1% 511kΩ 0402 Chip Resistor - Surface Mount ROHS; MPN: C5126239; Manufacturer: LCSC; Package: 0402; Value: 511K
footprint CAP 0402/1005 (Chip Capacitor, 2-Leads, Body 1.02x0.51mm, IPC Medium Density)
pins: 1, 2

## 536k
designator R?
CRCW0402536KFKED; Manufacturer: Vishay-Dale; Package: 0402 (1005 Metric); MPN: CRCW0402536KFKED; Value: 536k
pins: 1, 2

## 604K
designator R?
100mW Thick Film Resistors 75V ±100ppm/℃ ±1% 604kΩ 0603 Chip Resistor - Surface Mount ROHS; MPN: C2933246; Manufacturer: LCSC; Package: 0603 (1608 Metric); Value: 604K
footprint CAP 0603/1608 (Chip Capacitor, 2-Leads, Body 1.60x0.80mm, IPC High Density)
pins: 1, 2

## 732K_0603
designator R?
RES SMD 732K OHM 1% 1/10W 0603; Manufacturer: Yageo; Manufacturer Part Number: RC0603FR-07732KL; Package: 0603 (1608 Metric); Supplier: DigiKey; Supplier Part Number: 311-732KHRTR-ND; Temperature: -55°C ~ 155°C; value: 732K_0603
footprint 0603
pins: 1, 2

## 750R
designator R?
62.5mW Thick Film Resistors 50V ±100ppm/℃ ±1% 750Ω 0402 Chip Resistor - Surface Mount ROHS; Manufacturer: YAGEO; MPN: RC0402FR-07750RL; SPN: C137936; Package: 0402 (1005 Metric); Value: 750R; Supplier: LCSC; Operating Temperature: -55°C ~ 155°C; Supplier Availability: Active
pins: 1, 2

## 1000UF
designator C?, comment 1000UF/16V
CAP ALUM 1000UF 20% 16V SMD; Manufacturer: Nichicon; Manufacturer Part Number: UCL1C102MNL1GS; Value: 1000UF/16V; Package: SMD; Supplier: Digi-Key; Supplier Part Number: 493-3930-2-ND
pins: 1, 2

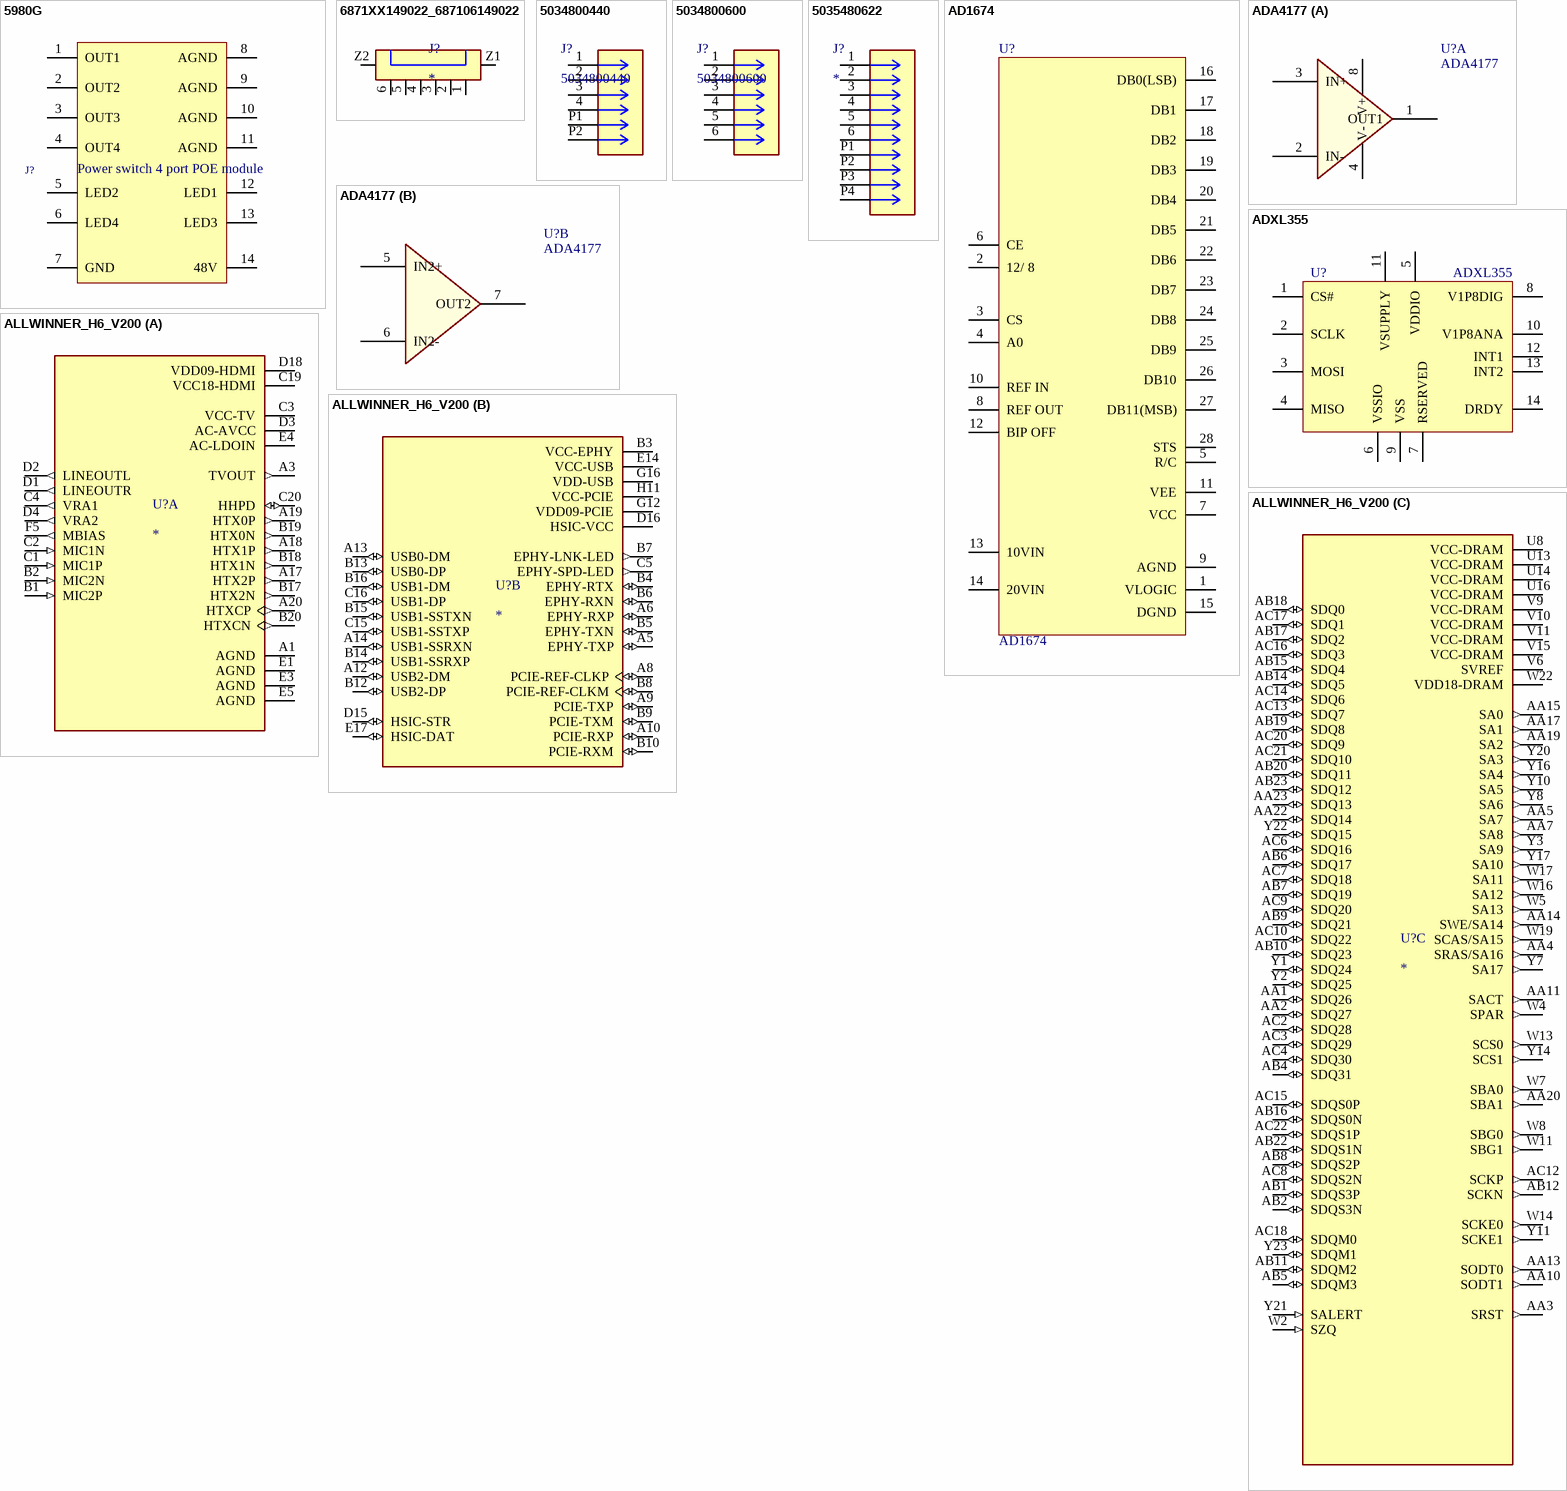
[diagram p3: symbols 5980G to ALLWINNER_H6_V200]

## 5980G
designator J?, comment Power switch 4 port POE module
4 port POE module; Value: Power switch 4 port POE module
pins: 1 OUT1, 2 OUT2, 3 OUT3, 4 OUT4, 5 LED2, 6 LED4, 7 GND, 8 AGND, 9 AGND, 10 AGND, 11 AGND, 12 LED1, 13 LED3, 14 48V

## 6871XX149022_687106149022
designator J?
MPN: 687106149022; MF: {'manufacturer': u'W\xfcrth Elektronik'}; SPN: 732-5994-2-ND; Package: None; Supplier: DigiKey; Value: *
footprint 687106149022
pins: 1, 2, 3, 4, 5, 6, Z1, Z2

## 5034800440
designator J?
CONN FFC FPC 4POS 0.5MM R/A; MF: Molex; SPN: 900-5034800440CT-ND; Package: None; Supplier: 900-5034800440CT-ND; Value: *; MPN: 5034800440
footprint 5034800440_MOL
pins: 1, 2, 3, 4, P1, P2

## 5034800600
designator J?
CONN FFC FPC 6POS 0.5MM R/A; MF: Molex; SPN: WM1387CT-ND; Package: None; Supplier: DigiKey; Value: 5034800600; MPN: 5034800600
footprint 503480-0600_MOL
pins: 1, 2, 3, 4, 5, 6

## 5035480622
designator J?
MPN: 5035480622; MF: Molex; SPN: 900-5035480622DKR-ND; Value: *; Supplier: DigiKey
footprint CON_5035480622
pins: 1, 2, 3, 4, 5, 6, P1, P2, P3, P4

## AD1674
designator U?
Analog to Digital Converters - ADC 12-Bit 100 kSPS Complete IC; Manufacturer: Analog Devices Inc.; Manufacturer Part Number: AD1674KRZ; Package: SOIC-28; Supplier: Mouser; Supplier Part Number: 584-AD1674KRZ; Unit Price: *; Value: AD1674
footprint ADC
pins: 1 VLOGIC, 2 12/ 8, 3 CS, 4 A0, 5 R/C, 6 CE, 7 VCC, 8 REF OUT, 9 AGND, 10 REF IN, 11 VEE, 12 BIP OFF, 13 10VIN, 14 20VIN, 15 DGND, 16 DB0(LSB), 17 DB1, 18 DB2, 19 DB3, 20 DB4, 21 DB5, 22 DB6, 23 DB7, 24 DB8, 25 DB9, 26 DB10, 27 DB11(MSB), 28 STS

## ADA4177
designator U?
IC OPAMP GP 1 CIRCUIT 8MSOP; Manufacturer: Analog Devices Inc.; Manufacturer Part Number: ADA4177-1ARMZ; Manufacturer Availability: Active; Supplier Part Number: ADA4177-1ARMZ-ND; Package: 8-MSOP; Supplier: Digi-Key; Value: ADA4177; Operating Temperature: -40°C ~ 125°C
footprint ADA4177
part A pins: 1 OUT1, 2 IN-, 3 IN+, 4 V-, 8 V+
part B pins: 5 IN2+, 6 IN2-, 7 OUT2

## ADXL355
designator U?
Accelerometers High Perf 3-Axis Digit 2g/ 4g/ 8g Accel; Manufacturer: Analog Devices; Manufacturer Part Number: ADXL355BEZ-RL7; Package: LCC-14; Supplier: Mouser; Supplier Part Number: 584-ADXL355BEZ-RL7; Unit Price: *; Value: ADXL355
footprint ADXL355 (LCC, 14-Pins, Body 6.00x6.00mmx2.40mm, Pitch 1.27mm, IPC Medium Density)
pins: 1 CS#, 2 SCLK, 3 MOSI, 4 MISO, 5 VDDIO, 6 VSSIO, 7 RSERVED, 8 V1P8DIG, 9 VSS, 10 V1P8ANA, 11 VSUPPLY, 12 INT1, 13 INT2, 14 DRDY

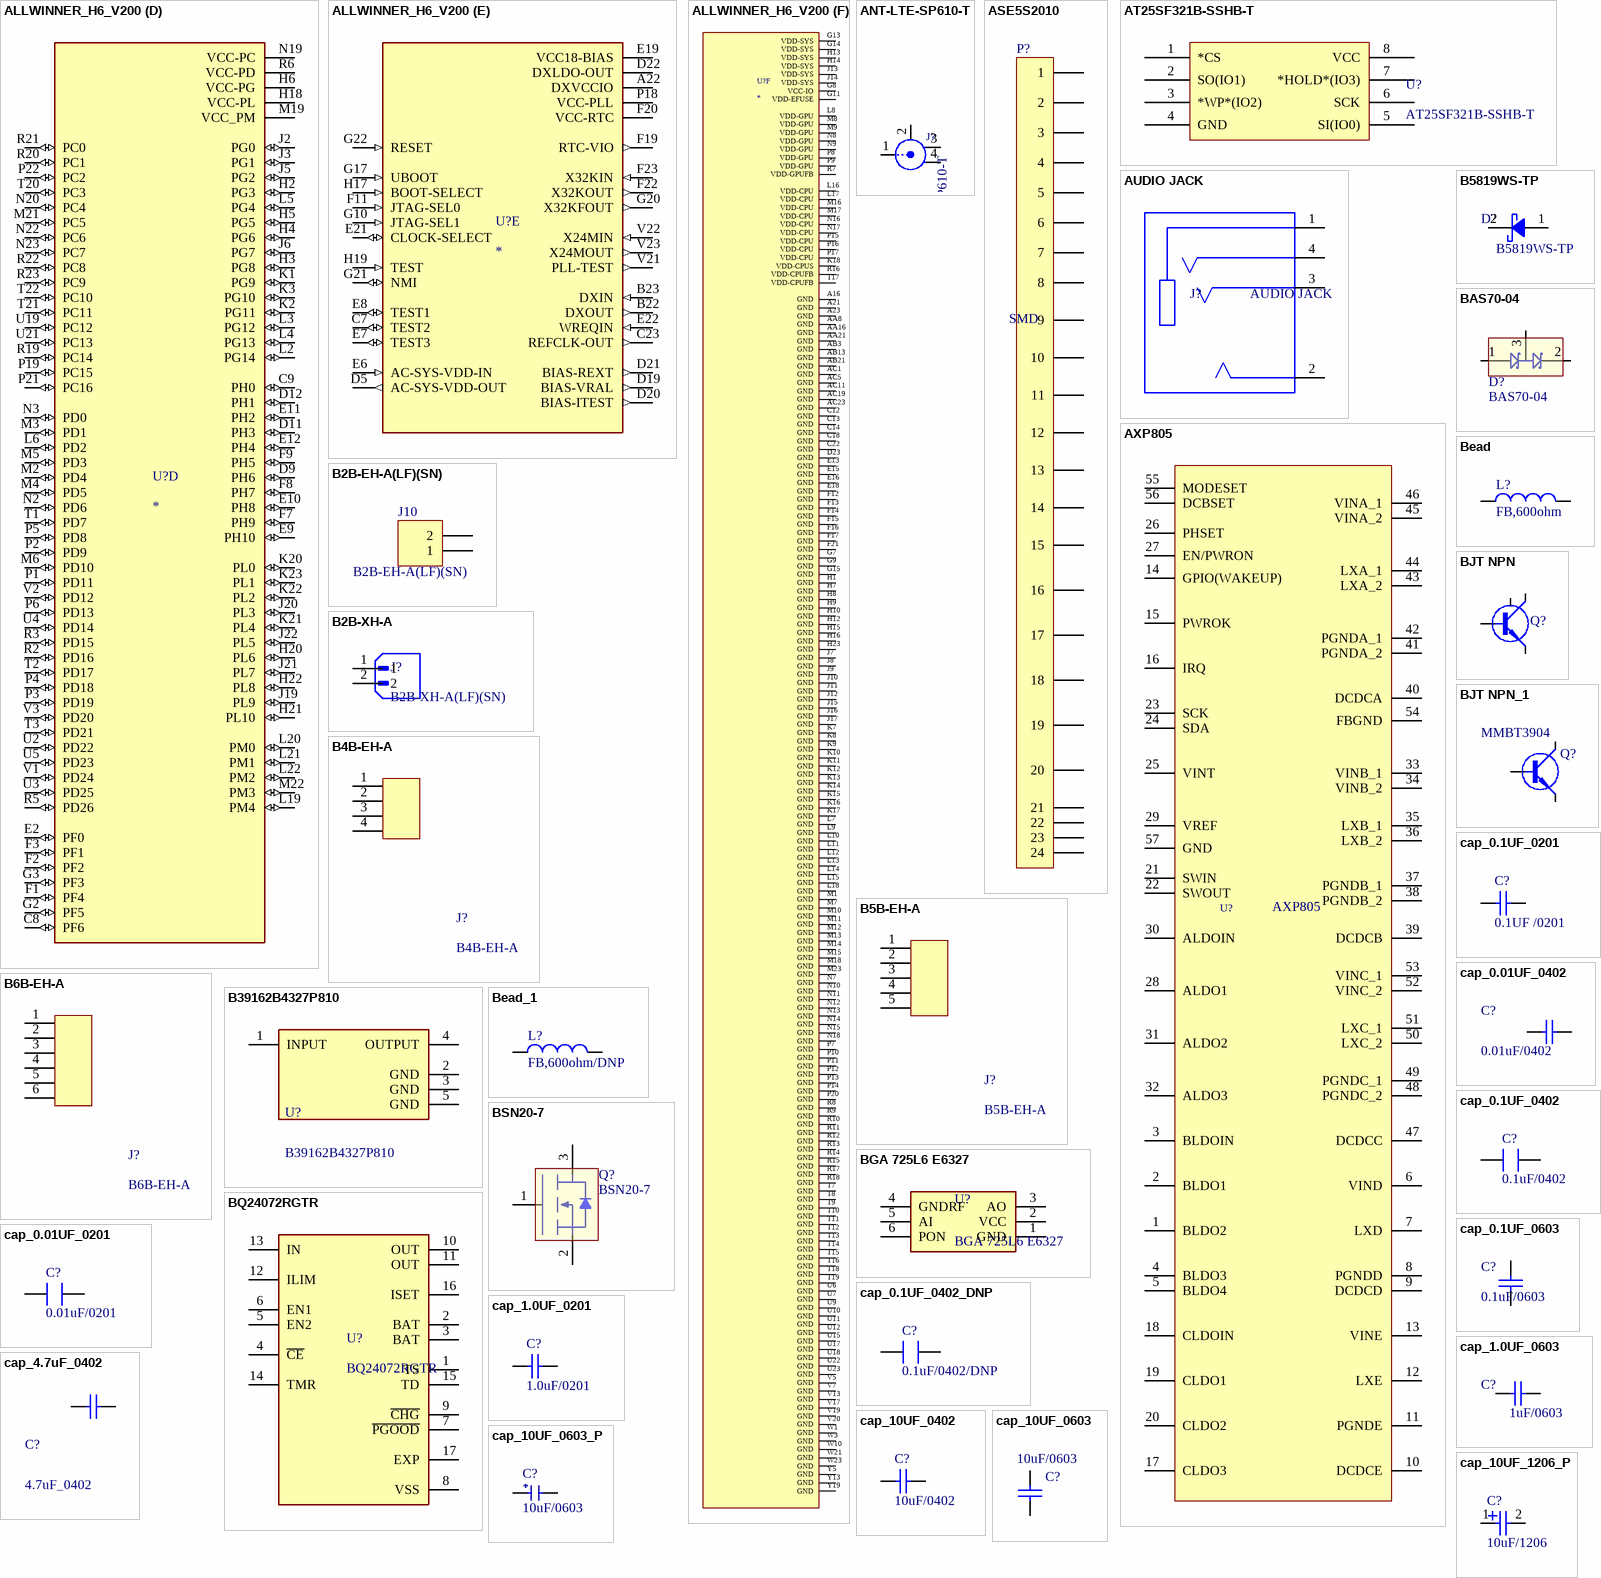
[diagram p4: symbols ALLWINNER_H6_V200 to cap_10UF_1206_P]

## ALLWINNER_H6_V200
designator U?
Quad Core - OTT Box Processor; MF: Allwinner Technology; MP: Allwinner H6 V200; Value: *; Availability: Unavailable; Price: None; Package: Package Analog Devices; SnapEDA_Link: https://www.snapeda.com/parts/Allwinner%20H6%20V200/Allwinner%20Technology/view-part/2893727/?ref=snap
footprint Allwinner
part A pins: A1 AGND (power), A3 TVOUT (out), A17 HTX2P (out), A18 HTX1P (out), A19 HTX0P (out), A20 HTXCP (out), B1 MIC2P (in), B2 MIC2N (in), B17 HTX2N (out), B18 HTX1N (out), B19 HTX0N (out), B20 HTXCN (out), C1 MIC1P (in), C2 MIC1N (in), C3 VCC-TV (power), C4 VRA1 (out), C19 VCC18-HDMI (power), C20 HHPD (io), D1 LINEOUTR (out), D2 LINEOUTL (out), D3 AC-AVCC (power), D4 VRA2 (out), D18 VDD09-HDMI (power), E1 AGND (power), E3 AGND (power), E4 AC-LDOIN (power), E5 AGND (power), F5 MBIAS (out)
part B pins: A5 EPHY-TXP (io), A6 EPHY-RXP (io), A8 PCIE-REF-CLKP (io), A9 PCIE-TXP (io), A10 PCIE-RXP (io), A12 USB2-DM (io), A13 USB0-DM (io), A14 USB1-SSRXN (io), B3 VCC-EPHY (power), B4 EPHY-RTX (io), B5 EPHY-TXN (io), B6 EPHY-RXN (io), B7 EPHY-LNK-LED (out), B8 PCIE-REF-CLKM (io), B9 PCIE-TXM (io), B10 PCIE-RXM (io), B12 USB2-DP (io), B13 USB0-DP (io), B14 USB1-SSRXP (io), B15 USB1-SSTXN (io), B16 USB1-DM (io), C5 EPHY-SPD-LED (out), C15 USB1-SSTXP (io), C16 USB1-DP (io), D15 HSIC-STR (io), D16 HSIC-VCC (power), E14 VCC-USB (power), E17 HSIC-DAT (io), G12 VDD09-PCIE (power), G16 VDD-USB (power), H11 VCC-PCIE (power)
part C pins: AA1 SDQ26 (io), AA2 SDQ27 (io), AA3 SRST (out), AA4 SRAS/SA16 (out), AA5 SA7 (out), AA7 SA8 (out), AA10 SODT1 (out), AA11 SACT (out), AA13 SODT0 (out), AA14 SWE/SA14 (out), AA15 SA0 (out), AA17 SA1 (out), AA19 SA2 (out), AA20 SBA1 (out), AA22 SDQ14 (io), AA23 SDQ13 (io), AB1 SDQS3P (io), AB2 SDQS3N (io), AB4 SDQ31 (io), AB5 SDQM3 (io), AB6 SDQ17 (io), AB7 SDQ19 (io), AB8 SDQS2P (io), AB9 SDQ21 (io), AB10 SDQ23 (io), AB11 SDQM2 (io), AB12 SCKN (out), AB14 SDQ5 (io), AB15 SDQ4 (io), AB16 SDQS0N (io), AB17 SDQ2 (io), AB18 SDQ0 (io), AB19 SDQ8 (io), AB20 SDQ11 (io), AB22 SDQS1N (io), AB23 SDQ12 (io), AC2 SDQ28 (io), AC3 SDQ29 (io), AC4 SDQ30 (io), AC6 SDQ16 (io), AC7 SDQ18 (io), AC8 SDQS2N (io), AC9 SDQ20 (io), AC10 SDQ22 (io), AC12 SCKP (out), AC13 SDQ7 (io), AC14 SDQ6 (io), AC15 SDQS0P (io), AC16 SDQ3 (io), AC17 SDQ1 (io), AC18 SDQM0 (io), AC20 SDQ9 (io), AC21 SDQ10 (io), AC22 SDQS1P (io), U8 VCC-DRAM (power), U13 VCC-DRAM (power), U14 VCC-DRAM (power), U16 VCC-DRAM (power), V6 SVREF (power), V9 VCC-DRAM (power), V10 VCC-DRAM (power), V11 VCC-DRAM (power), V15 VCC-DRAM (power), W2 SZQ (in), W4 SPAR (out), W5 SA13 (out), W7 SBA0 (out), W8 SBG0 (out), W11 SBG1 (out), W13 SCS0 (out), W14 SCKE0 (out), W16 SA12 (out), W17 SA11 (out), W19 SCAS/SA15 (out), W22 VDD18-DRAM (power), Y1 SDQ24 (io), Y2 SDQ25 (io), Y3 SA9 (out), Y7 SA17 (out), Y8 SA6 (out), Y10 SA5 (out), Y11 SCKE1 (out), Y14 SCS1 (out), Y16 SA4 (out), Y17 SA10 (out), Y20 SA3 (out), Y21 SALERT (in), Y22 SDQ15 (io), Y23 SDQM1 (io)
part D pins: C8 PF6 (io), C9 PH0 (io), D9 PH6 (io), D11 PH3 (io), D12 PH1 (io), E2 PF0 (io), E9 PH10 (io), E10 PH8 (io), E11 PH2 (io), E12 PH4 (io), F1 PF4 (io), F2 PF2 (io), F3 PF1 (io), F7 PH9 (io), F8 PH7 (io), F9 PH5 (io), G2 PF5 (io), G3 PF3 (io), H2 PG3 (io), H3 PG8 (io), H4 PG6 (io), H5 PG5 (io), H6 VCC-PG (power), H18 VCC-PL (power), H20 PL6 (io), H21 PL10 (io), H22 PL8 (io), J2 PG0 (io), J3 PG1 (io), J5 PG2 (io), J6 PG7 (io), J19 PL9 (io), J20 PL3 (io), J21 PL7 (io), J22 PL5 (io), K1 PG9 (io), K2 PG11 (io), K3 PG10 (io), K20 PL0 (io), K21 PL4 (io), K22 PL2 (io), K23 PL1 (io), L2 PG14 (io), L3 PG12 (io), L4 PG13 (io), L5 PG4 (io), L6 PD2 (io), L19 PM4 (io), L20 PM0 (io), L21 PM1 (io), L22 PM2 (io), M2 PD4 (io), M3 PD1 (io), M4 PD5 (io), M5 PD3 (io), M6 PD10 (io), M19 VCC_PM (power), M21 PC5 (io), M22 PM3 (io), N2 PD6 (io), N3 PD0 (io), N19 VCC-PC (power), N20 PC4 (io), N22 PC6 (io), N23 PC7 (io), P1 PD11 (io), P2 PD9 (io), P3 PD19 (io), P4 PD18 (io), P5 PD8 (io), P6 PD13 (io), P19 PC15 (io), P21 PC16 (io), P22 PC2 (io), R2 PD16 (io), R3 PD15 (io), R5 PD26 (io), R6 VCC-PD (power), R19 PC14 (io), R20 PC1 (io), R21 PC0 (io), R22 PC8 (io), R23 PC9 (io), T1 PD7 (io), T2 PD17 (io), T3 PD21 (io), T20 PC3 (io), T21 PC11 (io), T22 PC10 (io), U2 PD22 (io), U3 PD25 (io), U4 PD14 (io), U5 PD23 (io), U19 PC12 (io), U21 PC13 (io), V1 PD24 (io), V2 PD12 (io), V3 PD20 (io)
part E pins: A22 DXVCCIO (power), B22 DXOUT (out), B23 DXIN (in), C7 TEST2 (io), C23 REFCLK-OUT (out), D5 AC-SYS-VDD-OUT (out), D19 BIAS-VRAL (out), D20 BIAS-ITEST (out), D21 BIAS-REXT (out), D22 DXLDO-OUT (power), E6 AC-SYS-VDD-IN (in), E7 TEST3 (io), E8 TEST1 (io), E19 VCC18-BIAS (power), E21 CLOCK-SELECT (io), E22 WREQIN (in), F11 JTAG-SEL0 (in), F19 RTC-VIO (out), F20 VCC-RTC (power), F22 X32KOUT (out), F23 X32KIN (in), G10 JTAG-SEL1 (in), G17 UBOOT (in), G20 X32KFOUT (out), G21 NMI (io), G22 RESET (in), H17 BOOT-SELECT (in), H19 TEST (in), P18 VCC-PLL (power), V21 PLL-TEST (out), V22 X24MIN (in), V23 X24MOUT (out)
part F pins: A16 GND (power), A21 GND (power), A23 GND (power), AA8 GND (power), AA16 GND (power), AA21 GND (power), AB3 GND (power), AB13 GND (power), AB21 GND (power), AC1 GND (power), AC5 GND (power), AC11 GND (power), AC19 GND (power), AC23 GND (power), C12 GND (power), C13 GND (power), C14 GND (power), C18 GND (power), C22 GND (power), D23 GND (power), E13 GND (power), E15 GND (power), E16 GND (power), E18 GND (power), F12 GND (power), F13 GND (power), F14 GND (power), F15 GND (power), F16 GND (power), F17 GND (power), F21 GND (power), G7 GND (power), G8 VCC-IO (power), G9 GND (power), G11 VDD-EFUSE (power), G13 VDD-SYS (power), G14 VDD-SYS (power), G15 GND (power), H1 GND (power), H7 GND (power), H8 GND (power), H9 GND (power), H10 GND (power), H12 GND (power), H13 VDD-SYS (power), H14 VDD-SYS (power), H15 GND (power), H16 GND (power), H23 GND (power), J7 GND (power), J8 GND (power), J9 GND (power), J10 GND (power), J11 GND (power), J12 GND (power), J13 VDD-SYS (power), J14 VDD-SYS (power), J15 GND (power), J16 GND (power), J17 GND (power), K7 GND (power), K8 GND (power), K9 GND (power), K10 GND (power), K11 GND (power), K12 GND (power), K13 GND (power), K14 GND (power), K15 GND (power), K16 GND (power), K17 GND (power), K18 VDD-CPUS (power), L7 GND (power), L8 VDD-GPU (power), L9 GND (power), L10 GND (power), L11 GND (power), L12 GND (power), L13 GND (power), L14 GND (power), L15 GND (power), L16 VDD-CPU (power), L17 VDD-CPU (power), L18 GND (power), M1 GND (power), M7 GND (power), M8 VDD-GPU (power), M9 VDD-GPU (power), M10 GND (power), M11 GND (power), M12 GND (power), M13 GND (power), M14 GND (power), M15 GND (power), M16 VDD-CPU (power), M17 VDD-CPU (power), M18 GND (power), M23 GND (power), N7 GND (power), N8 VDD-GPU (power), N9 VDD-GPU (power), N10 GND (power), N11 GND (power), N12 GND (power), N13 GND (power), N14 GND (power), N15 GND (power), N16 VDD-CPU (power), N17 VDD-CPU (power), N18 GND (power), P7 GND (power), P8 VDD-GPU (power), P9 VDD-GPU (power), P10 GND (power), P11 GND (power), P12 GND (power), P13 GND (power), P14 GND (power), P15 VDD-CPU (power), P16 VDD-CPU (power), P17 VDD-CPU (power), P20 GND (power), R7 VDD-GPUFB (power), R8 GND (power), R9 GND (power), R10 GND (power), R11 GND (power), R12 GND (power), R13 GND (power), R14 GND (power), R15 GND (power), R16 VDD-CPUFB (power), R17 GND (power), R18 GND (power), T7 GND (power), T8 GND (power), T9 GND (power), T10 GND (power), T11 GND (power), T12 GND (power), T13 GND (power), T14 GND (power), T15 GND (power), T16 GND (power), T17 VDD-CPUFB (power), T18 GND (power), T19 GND (power), U6 GND (power), U7 GND (power), U9 GND (power), U10 GND (power), U11 GND (power), U12 GND (power), U15 GND (power), U17 GND (power), U18 GND (power), U22 GND (power), U23 GND (power), V5 GND (power), V7 GND (power), V13 GND (power), V17 GND (power), V19 GND (power), V20 GND (power), W1 GND (power), W3 GND (power), W10 GND (power), W21 GND (power), W23 GND (power), Y5 GND (power), Y13 GND (power), Y19 GND (power)

## ANT-LTE-SP610-T
designator J?
RF ANT LTE 698MHZ-2.7GHZ CHIP SL; Manufacturer: TE Connectivity Linx; SPN: 343-ANT-LTE-SP610-TCT-ND; Package: SMD; MPN: ANT-LTE-SP610-T; Supplier: DigiKey; Temperature: -55 to 155; Value: ANT-LTE-SP610-T
pins: 1, 2, 3, 4

## ASE5S2010
designator P?, comment SMD
Arrays, Edge Type, Mezzanine (Board to Board) ROHS; Manufacturer Part Number: ASE5S2010; Supplier: ASE5S2010; Supplier Part Number: C7435887; Value: SMD
footprint CONN-SMD_ASE5S2010
pins: 1, 2, 3, 4, 5, 6, 7, 8, 9, 10, 11, 12, 13, 14, 15, 16, 17, 18, 19, 20, 21, 22, 23, 24

## AT25SF321B-SSHB-T
designator U?
IC FLASH 32MBIT SPI/QUAD 8SOIC; Manufacturer: Renesas Electronics Corporation; Manufacturer Part Number: AT25SF321B-SSHB-T; Package: 8SOIC; Supplier: Digi-Key; Supplier Part Number: 1265-AT25SF321B-SSHB-TCT-ND; Value: AT25SF321B-SSHB-T
pins: 1 *CS, 2 SO(IO1), 3 *WP*(IO2), 4 GND, 5 SI(IO0), 6 SCK, 7 *HOLD*(IO3), 8 VCC